# Altium schematic symbol library MP6519GQ-Z.SchLib: 1 symbol
Pins are listed as number, name and electrical type; pins without a type are passive.

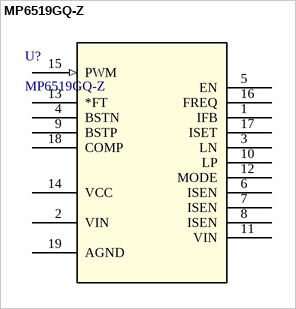
[diagram p0: symbol MP6519GQ-Z]

## MP6519GQ-Z
designator U?
2.5V - 28V 5A H-Bridge Current Regulator; Manufacturer_Name: Monolithic Power Systems; Copyright: Copyright (C) 2026 Ultra Librarian. All rights reserved.; Manufacturer_Part_Number: MP6519GQ-Z; RefDes: RefDes; Type: Type
footprint QFN-3x3_MP6519_MNP
pins: 1 IFB, 2 VIN (power), 3 LN, 4 BSTN, 5 EN, 6 ISEN, 7 ISEN, 8 ISEN, 9 BSTP, 10 LP, 11 VIN, 12 MODE, 13 *FT, 14 VCC (power), 15 PWM (in), 16 FREQ, 17 ISET, 18 COMP, 19 AGND (power)